# Altium schematic symbol library MP2338GTL-P.SchLib: 1 symbol
Pins are listed as number, name and electrical type; pins without a type are passive.

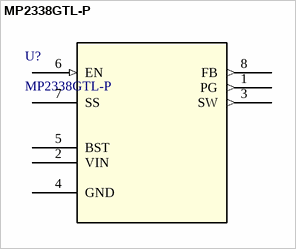
[diagram p0: symbol MP2338GTL-P]

## MP2338GTL-P
designator U?
High-Efficiency 28V 3A 450kHz Synchronous Step-Down Converter In SOT583 Package; Manufacturer_Name: Monolithic Power Systems; Copyright: Copyright (C) 2025 Ultra Librarian. All rights reserved.; Manufacturer_Part_Number: MP2338GTL-P; RefDes: RefDes; Type: Type
footprint SOT583_MP2338_MNP
pins: 1 PG (out), 2 VIN (power), 3 SW (out), 4 GND (power), 5 BST (power), 6 EN (in), 7 SS, 8 FB (out)